# Altium schematic symbol library actuator-driver.SchLib: 25 symbols
Pins are listed as number, name and electrical type; pins without a type are passive.

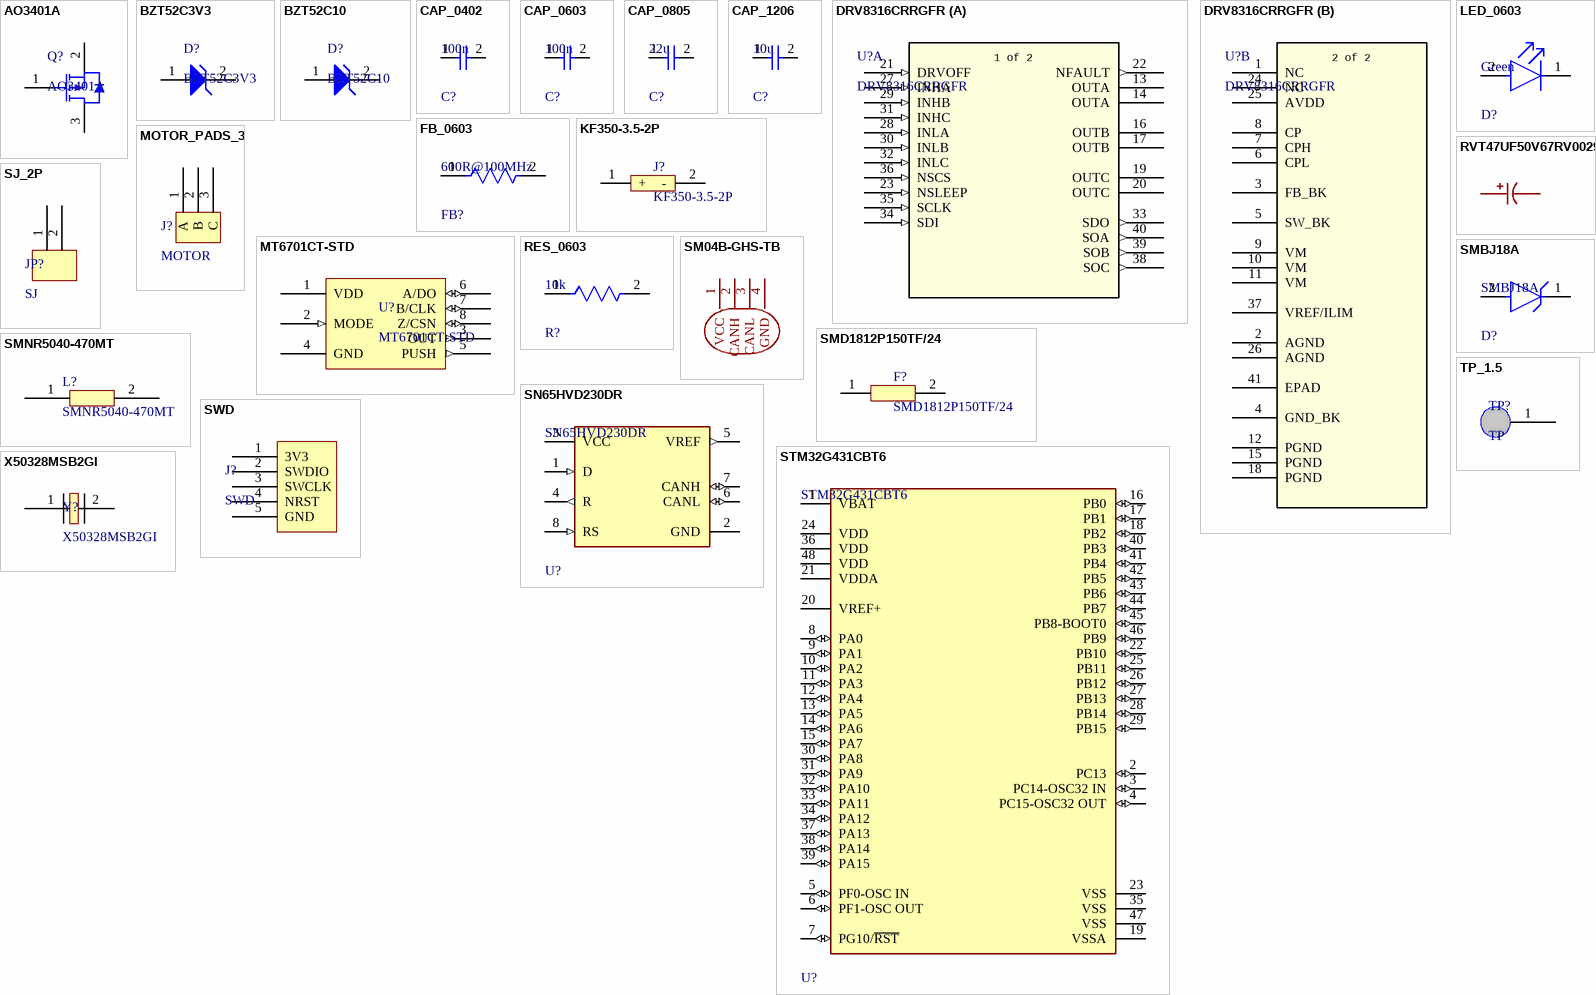
[diagram p0: symbols AO3401A to X50328MSB2GI]

## AO3401A
designator Q?
P-Channel MOSFET, 30 V, 4 A, -55 to 150 degC, 3-Pin SOT-23-3L, RoHS, Tape and Reel; Manufacturer: Alpha and Omega; Output Power (Max): NotRequiredW; Power Dissipation: 1.4W; Rad Hardened: No; Drain Efficiency: NotRequired%; Drain-Source On-Volt: 30V; Noise Figure: NotRequireddB; Frequency (Max): NotRequiredMHz; Number of  Elements: 1; Gate-Source Voltage (Max): ?12V; Drain Current (Max): 4A; Channel Mode: Enhancement; Drain-Source On-Res: 0.044ohm; Type: PowerMOSFET; Polarity: P; Package URL: http://www.aosmd.com/res/packaging_information/SOT-23-3L.pdf; Datasheet URL: http://www.aosmd.com/res/data_sheets/AO3401A.pdf; Package Type: SOT-23; Package Description: 3-Pin Small Outline Transistor, Body 2.95 x 1.6 mm, Pitch 0.95 mm; Mounting: SurfaceMount; Manufacturer URL: http://www.aosmd.com/; Continuous Drain Current: 4A; Package Reference: SOT-23-3L; Mounting Technology: SurfaceMount; Operating Temperature Classification: Military; Power Gain: NotRequireddB; Datasheet Version: Rev. 3, 03/2011; Operating Temp Range: -55Cto150C; Pin Count: 3
footprint AO-SOT-23-3L_V (SOT23, 3-Leads, Body 3.1x1.8mm, Pitch 0.95mm)
pins: 1 GATE, 2 SOURCE, 3 DRAIN

## BZT52C3V3
designator D?
Surface Mount Zener Diode, 3.3 V, SOD-123; Manufacturer: MDD (Microdiode); LCSC: C173413
footprint SOD-123_MDD
pins: 1 A, 2 K

## BZT52C10
designator D?
Surface Mount Zener Diode, 10 V, SOD-123; Manufacturer: Changjing (CJ); LCSC: C2103
footprint SOD-123_MDD
pins: 1 A, 2 K

## CAP_0402
designator C?, comment 100n
Capacitor, 0402; Value: 100n
footprint CAP_0402
pins: 1, 2

## CAP_0603
designator C?, comment 100n
Capacitor, 0603; Value: 100n
footprint RES_0603
pins: 1, 2

## CAP_0805
designator C?, comment 22u
Capacitor, 0805; Value: 22u
footprint CAP_0805 (Chip Capacitor, 2-Leads, Body 2.00x1.25mm, IPC Medium Density)
pins: 1, 2

## CAP_1206
designator C?, comment 10u
Capacitor, 1206; Value: 10u
footprint CAP_1206
pins: 1, 2

## DRV8316CRRGFR
designator U?
40-V max 8-A peak 3-phase motor driver with integrated current sensing, FETs, and enhanced CSA specs 40-VQFN -40 to 125; Manufacturer_Name: Texas Instruments; Type: Power Management; Copyright: Copyright (C) 2026 Ultra Librarian. All rights reserved.; Manufacturer_Part_Number: DRV8316CRRGFR; RefDes: RefDes
footprint VQFN40_RGF_TEX
part A pins: 13 OUTA (power), 14 OUTA (power), 16 OUTB (power), 17 OUTB (power), 19 OUTC (power), 20 OUTC (power), 21 DRVOFF (in), 22 NFAULT (out), 23 NSLEEP (in), 27 INHA (in), 28 INLA (in), 29 INHB (in), 30 INLB (in), 31 INHC (in), 32 INLC (in), 33 SDO (out), 34 SDI (in), 35 SCLK (in), 36 NSCS (in), 38 SOC (out), 39 SOB (out), 40 SOA (out)
part B pins: 1 NC, 2 AGND (power), 3 FB_BK (power), 4 GND_BK (power), 5 SW_BK (power), 6 CPL (power), 7 CPH (power), 8 CP (power), 9 VM (power), 10 VM (power), 11 VM (power), 12 PGND (power), 15 PGND (power), 18 PGND (power), 24 NC, 25 AVDD (power), 26 AGND (power), 37 VREF/ILIM (power), 41 EPAD (power)
part A text: 1 of 2
part B text: 2 of 2

## FB_0603
designator FB?, comment 600R@100MHz
Ferrite bead, 0603; Value: 600R@100MHz
footprint RES_0603
pins: 1, 2

## KF350-3.5-2P
designator J?
Screw terminal 2P 3.5 mm, power in
footprint TERM_KF350_2P
pins: 1 +, 2 -

## LED_0603
designator D?, comment Green
LED, 0603; NexarPartId: 549907; Forward Voltage: 2V; Viewing Angle: 130°; Lens Transparency: Clear; Power Rating: 75mW; Number of LEDs: 1; Luminous Intensity: 35mcd; Forward Current: 20mA; Dominant Wavelength: 571nm; Lens Color: Clear, Colorless; Reverse Voltage: 5V; Wavelength: 574nm; Number of Pins: 2; Packaging: Tape and Reel; Number of Elements: 1; Schedule B: 8541402000, 8541402000|8541402000|8541402000|8541402000|8541402000; Height: 550µm; Case/Package: 0603; Illumination Color: Green; Depth: 800µm; Max Operating Temperature: 85°C; RoHS: Compliant; Lens Style: Clear; Lead Free: Lead Free; Length: 1.6mm; Mount: Surface Mount; Test Current: 20mA; Width: 800µm; Case Code (Imperial): 0603; Min Operating Temperature: -55°C; Case Code (Metric): 1608; Radiation Hardening: No; Power Dissipation: 75mW; Color: Green; Value: Green
footprint LED_0603
pins: 1 C, 2 A

## MOTOR_PADS_3
designator J?, comment MOTOR
Motor phase solder pads
footprint MOTOR_PADS_3
pins: 1 A, 2 B, 3 C

## MT6701CT-STD
designator U?
Magnetic angle encoder, SOP-8
footprint FP-D0008A-MFG
pins: 1 VDD (power), 2 MODE (in), 3 OUT (out), 4 GND (power), 5 PUSH (out), 6 A/DO (io), 7 B/CLK (io), 8 Z/CSN (io)

## RES_0603
designator R?, comment 10k
Resistor, 0603; Value: 10k
footprint RES_0603
pins: 1, 2

## RVT47UF50V67RV0029
designator C?  (value not drawn)
47 uF 50 V aluminium electrolytic, 6.3x7.7; Manufacturer: KNSCHA(科尼盛); AddInBom: yes; ModelId: d5dd8793587942c3ae18823ce868290a; ModelName: CAP-SMD_BD6.3-L6.6-W6.6-H7.7; ModelTransform: 275.59,259.842,0,0,0,0,0,0,0; Value: 47uF; Tolerance: ±20%; Voltage Rating: 50V; Ripple Current: 70mA@120Hz; Lifetime: 2000hrs@105℃; Polarity type: Polarized; Symbol: RVT47UF50V67RV0029; LCSC Part Name: 47uF ±20% 50V; SupplierPart: C2887275; ManufacturerPart: RVT47UF50V67RV0029; Supplier Footprint: SMD,D6.3xL7.7mm; JLCPCB Part Class: Extended Part; Datasheet: https://item.szlcsc.com/datasheet/RVT47UF50V67RV0029/3103843.html; Supplier: LCSC; ConvertToPcb: yes; FootprintName: CAP-SMD_BD6.3-L6.6-W6.6-LS7.6-FD; Equivalent Series Resistance(ESR): -; Diameter: 6.3mm; Height - Seated (Max): 7.7mm; Operating Temperature: -55℃~+105℃
footprint CAP_ELEC_6.3x7.7
pins: 1 +, 2 -

## SJ_2P
designator JP?, comment SJ
Solder jumper, 2-pad, open
footprint SJ_2P
pins: 1 22, 2 23

## SM04B-GHS-TB
designator J?  (value not drawn)
JST GH 4-pin side entry, CAN; Symbol: SM04B-GHS-TB(LF)(SN); AddInBom: yes; ModelId: b0352f6928cf4bf099b202a6090d3c8d; ModelName: CONN-SMD_GH1.25-WS-4P; ModelTransform: 324.8025,191.3382,0,0,0,0,0,-6.024,0; Pins Structure: 1x4P; Pitch: 1.25mm; Number of PINs Per Row: 4; Current Rating: 1A; Voltage Rating: 50V; Plastic Material: PA9T; Flame Retardant Rating: UL94V-0; Supplementary Features: Auxiliary Solder Pin; Z-Height of the Board: 4.25mm; X-Length of Bottom Edge on Board (Spacing Line): 8.25mm; Y-Width of Bottom Edge on Board: 4.13mm; LCSC Part Name: 1x4P 间距:1.25mm 卧贴 系列:GH; SupplierPart: C189895; Manufacturer: JST; ManufacturerPart: SM04B-GHS-TB(LF)(SN); Supplier Footprint: SMD,P=1.25mm,卧贴; JLCPCB Part Class: Extended Part; Datasheet: https://item.szlcsc.com/datasheet/SM04B-GHS-TB(LF)(SN)/207060.html; Supplier: LCSC; ConvertToPcb: yes; FootprintName: CONN-SMD_4P-P1.25_SM04B-GHS-TB-LF-SN; Mounting Type: Surface Mount, Right Angle; Reference Series: GH; Number of Pins: 4P; Number of Rows: 1; Row Spacing: -; Contact Material: Phosphor bronze; Contact Plating: Tin; Operating Temperature: -25℃~+85℃; Color: White
footprint JST_GH_SM04B
pins: 1 VCC, 2 CANH, 3 CANL, 4 GND

## SMBJ18A
designator D?
TVS DIODE 18V 29.2V DO214AA; Manufacturer: RUILON; Number Of Channels: 1; Max Junction Temp: +150°C; Breakdown Voltage: 20V; Peak Pulse Power: 600W; Direction: Unidirectional; Peak Pulse Current: 20.6A; RoHS: TRUE; ComponentLink2Description: Datasheet; Device Class L1: Circuit Protection; Manufacturer Part Number: SMBJ18A; Clamping Voltage: 29.2V; Height: 2.61mm; Temperature Range Low: -65°C; Temperature: -65°C to +150°C; Lead Free: Yes; Category: Diode; Reverse Standoff Voltage: 18V; Octopart: https://octopart.com/smbj18a-littelfuse-35303; ComponentLink2URL: https://www.littelfuse.com/~/media/electronics/datasheets/tvs_diodes/littelfuse_tvs_diode_smbj_datasheet.pdf.pdf; Package: SMBJ; Device Class L2: TVS Diodes; Automotive: No; Mouser Description: TVS Diodes - Transient Voltage Suppressors 18Vr 600W 20.6A 5% UniDirectional; Temperature Range High: +150°C; Device Class L3: unset; Digikey Description: TVS DIODE 18V 29.2V DO214AA; LCSC: C10212
footprint FP-SMBJ-MFG
pins: 1 C, 2 A

## SMD1812P150TF/24
designator F?
PTC resettable fuse, 24 V, 1.5 A hold, 1812
footprint PTC_1812_RUILON
pins: 1, 2

## SMNR5040-470MT
designator L?
47 uH shielded power inductor, 5x5x4 mm
footprint SMNR5040
pins: 1 14, 2 15

## SN65HVD230DR
designator U?
IC TRANSCEIVER HALF 1/1 8SOIC; Number of Transceivers: 1; Operating Supply Voltage: 3.3V; Number of I/Os: 2; Max Supply Current: 17mA; Max Supply Voltage: 3.6V; Min Supply Voltage: 3V; Data Rate: 1Mbps; Min Operating Temperature: -40°C; Packaging: Tape and Reel; Lead Free: Lead Free; Number of Transmit Buffers: 1; Max Operating Temperature: 85°C; Number of Receive Buffers: 1; Number of Pins: 8; Package Quantity: 1; Radiation Hardening: No; Case/Package: D; REACH SVHC: No SVHC; Weight: 0.002561oz; Termination: SMD/SMT; Contact Plating: Gold; Nominal Supply Current: 17mA; Number of Receivers: 1; Number of Drivers: 1
footprint FP-D0008A-MFG
pins: 1 D (in), 2 GND (power), 3 VCC (power), 4 R (out), 5 VREF (out), 6 CANL (io), 7 CANH (io), 8 RS (in)

## STM32G431CBT6
designator U?
MAINSTREAM ARM CORTEX-M4+ MCU 17; Manufacturer: STMicroelectronics; Number Of Adc Channels: 17; Number Of I/Os: 38; Standoff Height: 0.05mm; Number Of Usb Channels: 1; Data Bus Width: 32bits; Number Of I2C Channels: 3; Number Of Pwm Channels: 31; Frequency: 170MHz; Memory Type: FLASH; Number Of Timers/Counters: 14; Ram Size: 32KBytes; Max Junction Temp: +105°C; Memory Size: 128KBytes; Min Supply Voltage: 1.62V; Max Supply Voltage: 3.6V; Number Of Uart Channels: 4; Interface: I2C,SPI,UART,USART,CAN,USB,LIN,IrDA,I2S; Temperature Range Low: -40°C; Lead Free: Yes; Device Class L3: Microcontrollers; Number Of Cores: 1; Temperature Range High: +85°C; Height: 1.6mm; Digikey Description: MAINSTREAM ARM CORTEX-M4+ MCU 17; Device Class L1: Integrated Circuits (ICs); Package: LQFP48-5B; RoHS: TRUE; Number Of A/D Converters: 1; Core Architecture: Arm Cortex-M4; Device Class L2: Embedded Processors and Controllers; ComponentLink2Description: Datasheet; Temperature: -40°C to +85°C; Ambient Temperature Range High: +85°C; Ambient Temperature Range Low: -40°C; Octopart: https://octopart.com/stm32g431cbt6-stmicroelectronics-98835224; ComponentLink2URL: https://www.st.com/resource/en/datasheet/stm32g431cb.pdf; Automotive: No; Number Of Spi Channels: 3; Manufacturer Part Number: STM32G431CBT6; Category: IC
footprint FP-LQFP48-5B-MFG
pins: 1 VBAT (power), 2 PC13 (io), 3 PC14-OSC32 IN (io), 4 PC15-OSC32 OUT (io), 5 PF0-OSC IN (io), 6 PF1-OSC OUT (io), 7 PG10/~{RST} (io), 8 PA0 (io), 9 PA1 (io), 10 PA2 (io), 11 PA3 (io), 12 PA4 (io), 13 PA5 (io), 14 PA6 (io), 15 PA7 (io), 16 PB0 (io), 17 PB1 (io), 18 PB2 (io), 19 VSSA (power), 20 VREF+ (power), 21 VDDA (power), 22 PB10 (io), 23 VSS (power), 24 VDD (power), 25 PB11 (io), 26 PB12 (io), 27 PB13 (io), 28 PB14 (io), 29 PB15 (io), 30 PA8 (io), 31 PA9 (io), 32 PA10 (io), 33 PA11 (io), 34 PA12 (io), 35 VSS (power), 36 VDD (power), 37 PA13 (io), 38 PA14 (io), 39 PA15 (io), 40 PB3 (io), 41 PB4 (io), 42 PB5 (io), 43 PB6 (io), 44 PB7 (io), 45 PB8-BOOT0 (io), 46 PB9 (io), 47 VSS (power), 48 VDD (power)

## SWD
designator J?
SWD header 1x5 2.54 mm
footprint HDR_1x5_2.54
pins: 1 3V3, 2 SWDIO, 3 SWCLK, 4 NRST, 5 GND

## TP_1.5
designator TP?, comment TP
Test pad, 1.5 mm round
footprint TP_1.5
pins: 1 21

## X50328MSB2GI
designator Y?
8 MHz crystal, 5032, 2-pad
footprint Crystal_5032_2P_YXC
pins: 1 12, 2 0